# Altium schematic symbol library Schlib1.SchLib: 8 symbols
Pins are listed as number, name and electrical type; pins without a type are passive.

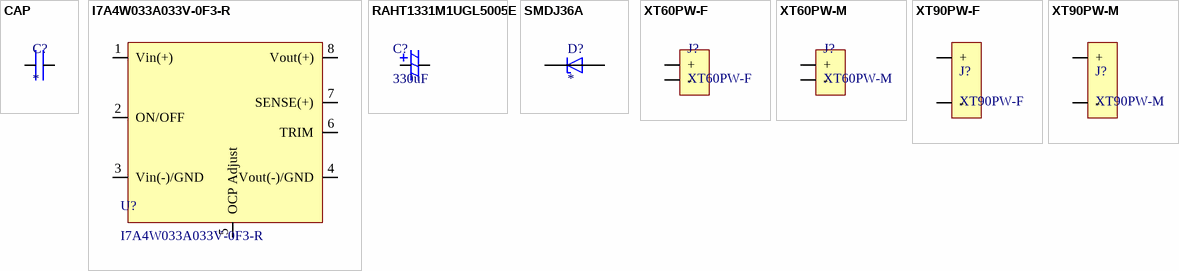
[diagram p0: symbols CAP to XT90PW-M]

## CAP
designator C?
pins: 1, 2

## I7A4W033A033V-0F3-R
designator U?
400W-1000W, 9-18V, 18-32V, 18-50V or 28-60V Input Non-Isolated Step Down DC-DC Converter
pins: 1 Vin(+), 2 ON/OFF, 3 Vin(-)/GND, 4 Vout(-)/GND, 5 OCP Adjust, 6 TRIM, 7 SENSE(+), 8 Vout(+)

## RAHT1331M1UGL5005E
designator C?, comment 330uF
Aluminum Organic Polymer Capacitors 50V 330uF 105C ESR=2mOhms AECQ 12.5x12.5mm
footprint RAHT1331M1UGL5005E
pins: 1, 2

## SMDJ36A
designator D?
3000W, 42.1V, 5%, Unidirectional, TVS; MF: Taiwan Semiconductor; MP: SMDJ36A; Package: SMC-2 Taiwan Semiconductor; Check_prices: https://www.snapeda.com/parts/SMDJ36A/Taiwan+Semiconductor/view-part/?ref=eda; Price: None; Purchase-URL: https://pricing.snapeda.com/search/part/SMDJ36A/?ref=eda; Value: *; SnapEDA_Link: https://www.snapeda.com/parts/SMDJ36A/Taiwan+Semiconductor/view-part/?ref=snap; Availability: In Stock
footprint DIOM6859X262N
footprint DIOM6859X262N
pins: A, C

## XT60PW-F
designator J?
footprint AMASS_XT60PW-F
pins: 1 +, 2 -

## XT60PW-M
designator J?
footprint AMASS_XT60PW-M
pins: 1 +, 2 -

## XT90PW-F
designator J?
pins: 1 +, 2 -

## XT90PW-M
designator J?
pins: 1 +, 2 -